# Altium footprint library TPS3851H33EDRBR.PcbLib: 1 footprints
Each footprint in its own frame and in the unit in brackets; x right, y up, seen from the top. Pads: shape width x height; smd on the part's side, far side on the other; paste and mask are expansions set on the pad; w line width, h text height; cw(c..) or ccw(c..) is an arc to the next point about the centre after c.
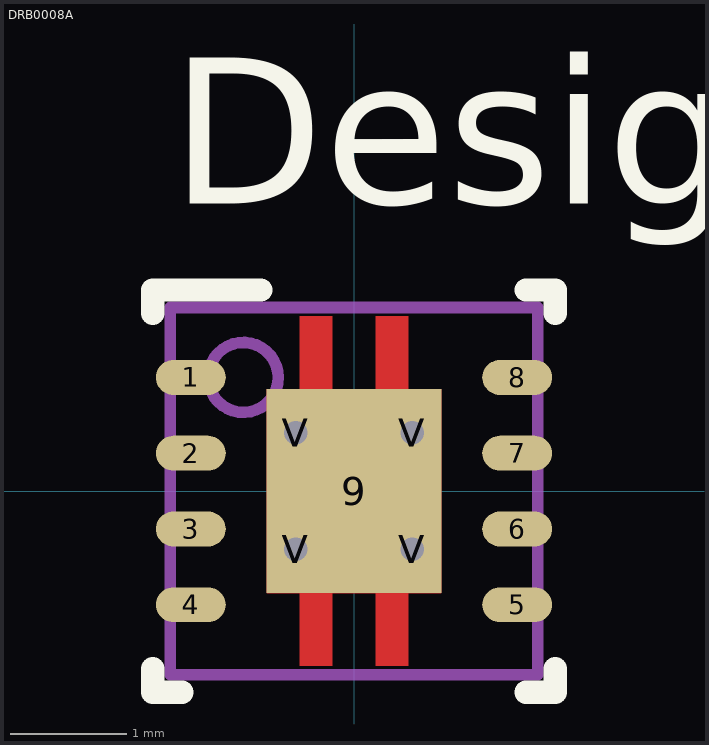
[diagram p0: the footprint, top view; thin cyan lines are the x and y axes]

## DRB0008A [mm]
pads (13):
  oval 0.6x0.3 smd paste+0 mask+0.051: 1(-1.4,0.975) 2(-1.4,0.325) 3(-1.4,-0.325) 4(-1.4,-0.975) 5(1.4,-0.975) 6(1.4,-0.325) 7(1.4,0.325) 8(1.4,0.975)
  rect 1.5x1.75 smd paste-0.862 mask+0.051: 9(0,0)
  round 0.5 hole 0.203 paste-2539.97 mask+0.051: V(-0.5,-0.5) V(-0.5,0.5) V(0.5,-0.5) V(0.5,0.5)
Top Layer:
  region: -0.185,-1.5 -0.465,-1.5 -0.465,-0.875 -0.75,-0.875 -0.75,0.875 -0.465,0.875 -0.465,1.5 -0.185,1.5 -0.185,0.875 0.185,0.875 0.185,1.5 0.465,1.5 0.465,0.875 0.75,0.875 0.75,-0.875 0.465,-0.875 0.465,-1.5 0.185,-1.5 0.185,-0.875 -0.185,-0.875
Top Overlay:
  lines w0.2: -1.725,-1.525 -1.725,-1.725 -1.475,-1.725 ; -1.725,1.525 -1.725,1.725 -0.8,1.725 ; 1.475,-1.725 1.725,-1.725 1.725,-1.525 ; 1.475,1.725 1.725,1.725 1.725,1.525
  text ".Designator" at -3.492,-0.635 h1.27
  text "Designator25" at -1.575,2.464 h1.27
Top Paste:
  region: -0.691,0.793 -0.691,-0.793 0.692,-0.793 0.692,0.793
Top Solder:
  region: -0.185,-1.551 -0.465,-1.551 -0.475,-1.55 -0.484,-1.547 -0.493,-1.542 -0.501,-1.536 -0.507,-1.528 -0.512,-1.519 -0.515,-1.51 -0.516,-1.5 -0.516,-0.926 -0.75,-0.926 -0.76,-0.925 -0.769,-0.922 -0.778,-0.917 -0.786,-0.911 -0.792,-0.903 -0.797,-0.894 -0.8,-0.885 -0.801,-0.875 -0.801,0.875 -0.8,0.885 -0.797,0.894 -0.792,0.903 -0.786,0.911 -0.778,0.917 -0.769,0.922 -0.76,0.925 -0.75,0.926 -0.516,0.926 -0.516,1.5 -0.515,1.51 -0.512,1.519 -0.507,1.528 -0.501,1.536 -0.493,1.542 -0.484,1.547 -0.475,1.55 -0.465,1.551 -0.185,1.551 -0.175,1.55 -0.166,1.547 -0.157,1.542 -0.149,1.536 -0.143,1.528 -0.138,1.519 -0.135,1.51 -0.134,1.5 -0.134,0.926 0.134,0.926 0.134,1.5 0.135,1.51 0.138,1.519 0.143,1.528 0.149,1.536 0.157,1.542 0.166,1.547 0.175,1.55 0.185,1.551 0.465,1.551 0.475,1.55 0.484,1.547 0.493,1.542 0.501,1.536 0.507,1.528 0.512,1.519 0.515,1.51 0.516,1.5 0.516,0.926 0.75,0.926 0.76,0.925 0.769,0.922 0.778,0.917 0.786,0.911 0.792,0.903 0.797,0.894 0.8,0.885 0.801,0.875 0.801,-0.875 0.8,-0.885 0.797,-0.894 0.792,-0.903 0.786,-0.911 0.778,-0.917 0.769,-0.922 0.76,-0.925 0.75,-0.926 0.516,-0.926 0.516,-1.5 0.515,-1.51 0.512,-1.519 0.507,-1.528 0.501,-1.536 0.493,-1.542 0.484,-1.547 0.475,-1.55 0.465,-1.551 0.185,-1.551 0.175,-1.55 0.166,-1.547 0.157,-1.542 0.149,-1.536 0.143,-1.528 0.138,-1.519 0.135,-1.51 0.134,-1.5 0.134,-0.926 -0.134,-0.926 -0.134,-1.5 -0.135,-1.51 -0.138,-1.519 -0.143,-1.528 -0.149,-1.536 -0.157,-1.542 -0.166,-1.547 -0.175,-1.55
Mechanical 13:
  circle w0.1: c-0.95,0.975 r0.3
  lines w0.1: -1.575,-1.575 -1.575,1.575 1.575,1.575 1.575,-1.575 -1.575,-1.575
  text ".Designator" at -3.492,-0.635 h1.27